# Altium footprint library Miscellaneous Devices.PcbLib: 306 footprints (part 3 of 20)
Each footprint in its own frame and in the unit in brackets; x right, y up, seen from the top. Pads: shape width x height; smd on the part's side, far side on the other; paste and mask are expansions set on the pad; w line width, h text height; cw(c..) or ccw(c..) is an arc to the next point about the centre after c.
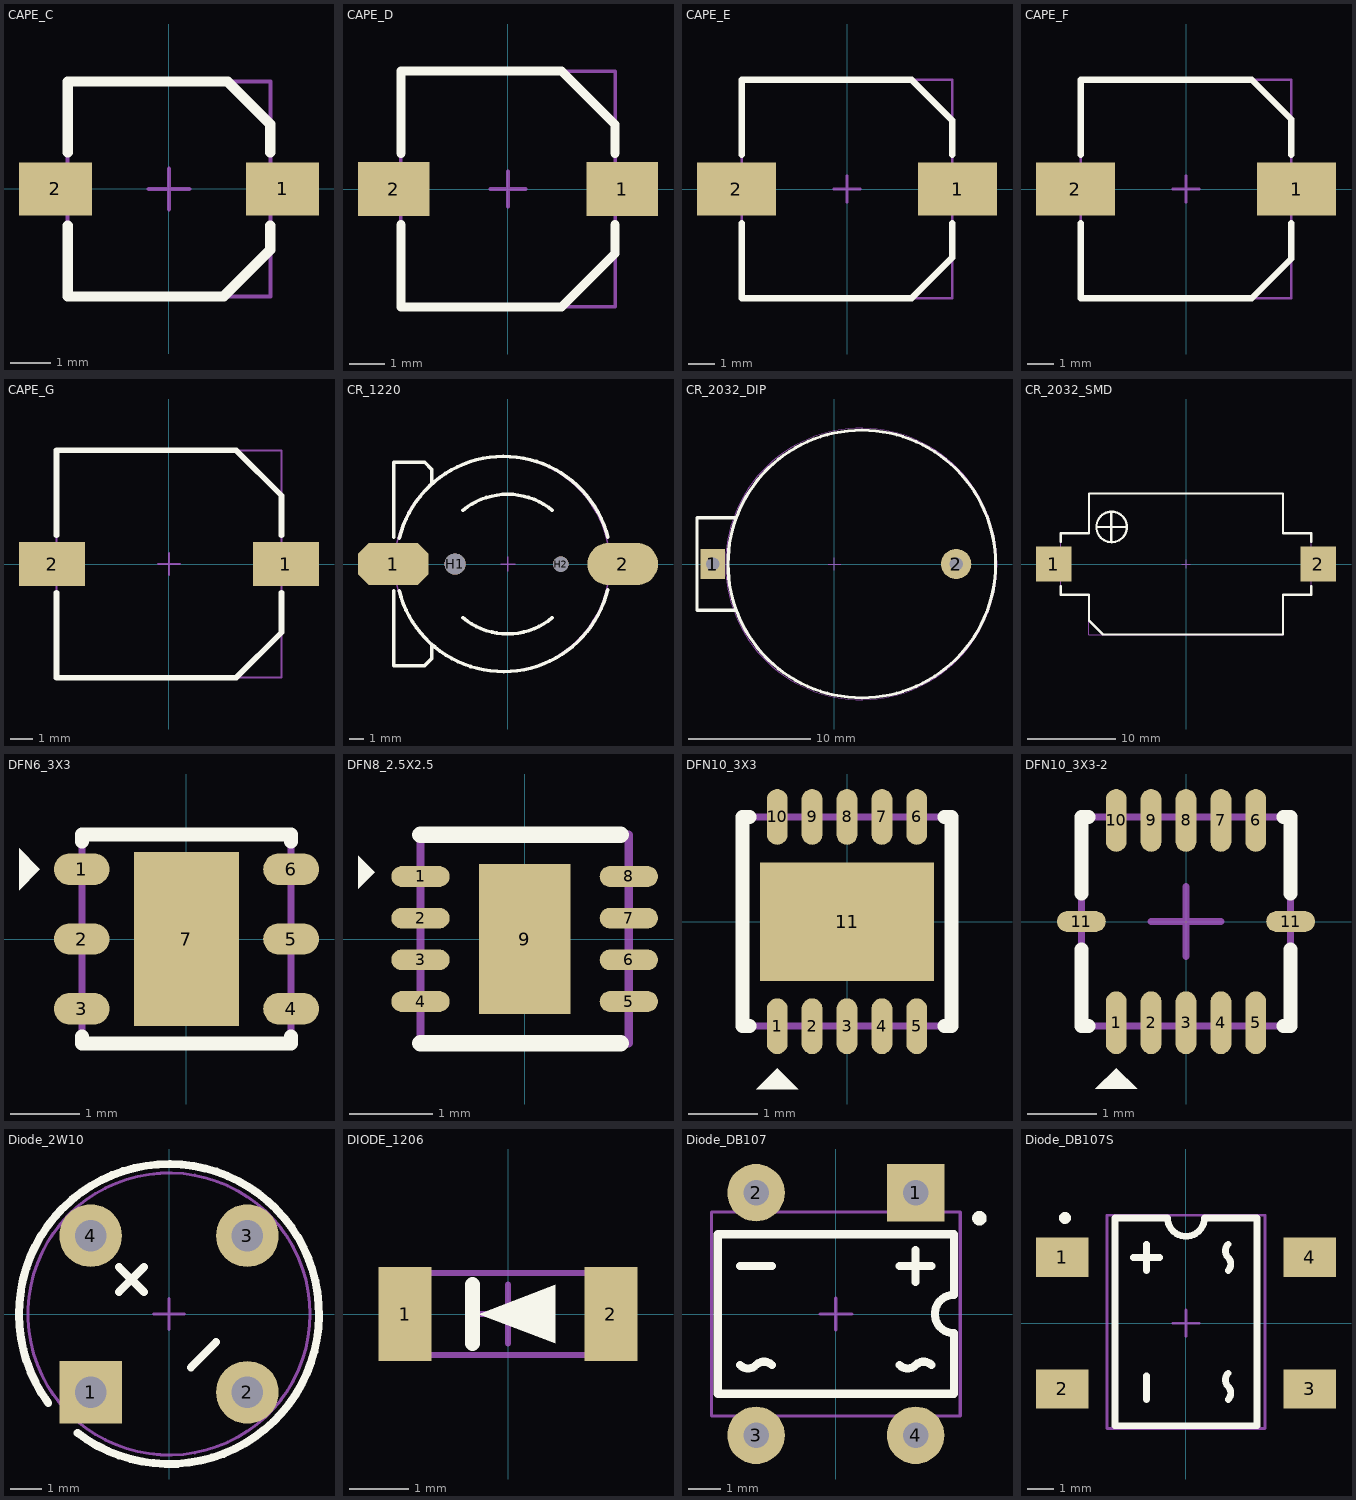
[diagram p2: the footprints below, top view; thin cyan lines are the x and y axes]

## CAPE_C [mm] "5X5.3X5.4"
pads (2):
  rect 1.8x1.3 smd: 1(2.8,0) 2(-2.8,0)
Top Overlay:
  lines w0.254: -2.5,-0.9 -2.5,-2.65 1.35,-2.65 2.5,-1.5 2.5,-0.9 ; -2.5,0.9 -2.5,2.65 1.45,2.65 2.5,1.6 2.5,0.9
Mechanical 15:
  lines w0.1: -0.5,0 0.5,0 ; 0,-0.5 0,0.5 ; -2.5,-2.65 -2.5,2.65 2.5,2.65 2.5,-2.65 -2.5,-2.65
3D body: height 5.41, standoff 0, extent -2.95,-2.6 2.95,2.7

## CAPE_D [mm] "6.3X6.6X5.4"
pads (2):
  rect 2x1.5 smd: 1(3.2,0) 2(-3.2,0)
Top Overlay:
  lines w0.254: -3,-1 -3,-3.3 1.5,-3.3 3,-1.8 3,-1 ; -3,1 -3,3.3 1.5,3.3 3,1.8 3,1
Mechanical 15:
  lines w0.1: -0.5,0 0.5,0 ; 0,-0.5 0,0.5 ; -3,-3.3 -3,3.3 3,3.3 3,-3.3 -3,-3.3
3D body: height 5.4, standoff 0, extent -3.5,-3.3 3.5,3.3

## CAPE_E [mm] "8X8.3X6.2"
pads (2):
  rect 3x2 smd: 1(4.2,0) 2(-4.2,0)
Top Overlay:
  lines w0.254: -4,-1.3 -4,-4.15 2.45,-4.15 4,-2.6 4,-1.3 ; -4,1.3 -4,4.15 2.45,4.15 4,2.6 4,1.3
Mechanical 15:
  lines w0.1: -0.5,0 0.5,0 ; 0,-0.5 0,0.5 ; -4,-4.15 -4,4.15 4,4.15 4,-4.15 -4,-4.15
3D body: height 6.2, standoff 0, extent -4.5,-4.15 4.5,4.15

## CAPE_F [mm] "8X8.3X10.2"
pads (2):
  rect 3x2 smd: 1(4.2,0) 2(-4.2,0)
Top Overlay:
  lines w0.254: -4,-1.3 -4,-4.15 2.5,-4.15 4,-2.65 4,-1.3 ; -4,1.3 -4,4.15 2.5,4.15 4,2.65 4,1.3
Mechanical 15:
  lines w0.1: -0.5,0 0.5,0 ; 0,-0.5 0,0.5 ; -4,-4.15 -4,4.15 4,4.15 4,-4.15 -4,-4.15
3D body: height 10.2, standoff 0, extent -4.95,-4.15 4.95,4.15

## CAPE_G [mm] "10X10.3X10.2"
pads (2):
  rect 3x2 smd: 1(5.3,0) 2(-5.3,0)
Top Overlay:
  lines w0.254: -5.1,-1.3 -5.1,-5.15 3.05,-5.15 5.1,-3.1 5.1,-1.3 ; -5.1,1.3 -5.1,5.15 3.05,5.15 5.1,3.1 5.1,1.3
Mechanical 15:
  lines w0.1: -0.5,0 0.5,0 ; 0,-0.5 0,0.5 ; -5.1,-5.15 5.1,-5.15 5.1,5.15 -5.1,5.15 -5.1,-5.15
3D body: height 10.2, standoff 0, extent -5.8,-5.15 5.8,5.15

## CR_1220 [mm]
pads (4):
  oct 5x3 smd: 1(-8.128,0)
  oval 5x3 smd: 2(8.128,0)
  round 1.5 hole 1.5 unplated: H1(-3.75,0)
  round 1.1 hole 1.1 unplated: H2(3.75,0)
Top Overlay:
  lines w0.254: -8.1,-1.9 -8.1,-7.194 -5.894,-7.194 -5.4,-6.7 -5.4,-5.7 ; -8.1,1.9 -8.1,7.206 -5.906,7.206 -5.4,6.7 -5.4,5.7 ; -7.714,-1.903 ccw(c-0.334,-0.004) 7.067,-1.817 ; -7.702,1.825 cw(c-0.302,0.007) 7.08,1.895 ; -3.2,-3.8 ccw(c-0.025,0.01) 3.147,-3.802 ; -3.2,3.8 cw(c-0.031,-0.015) 3.141,3.798
Mechanical 15:
  circle w0.1: c-0.4,0 r7.6
  lines w0.1: -0.5,0 0.5,0 ; 0,-0.5 0,0.5
3D body: height 4.04, standoff -0.9, extent -9.5,-7.506 9,7.491

## CR_2032_DIP [mm]
pads (2):
  rect 2x2.5 hole 1.1: 1(-10,0)
  round 2.5 hole 1.1: 2(10,0)
Top Overlay:
  circle w0.254: c2.251,0 r11
  lines w0.254: -8.199,-3.8 -11.3,-3.8 -11.3,3.8 -8.199,3.8
Mechanical 15:
  circle w0.1: c2.2,0 r11.16
  lines w0.1: -0.5,0 0.5,0 ; 0,-0.5 0,0.5
3D body: height 8.6, standoff -3.9, extent -11.14,-11 13.36,11

## CR_2032_SMD [mm]
pads (2):
  rect 4x4 smd: 1(-15,0) 2(15,0)
Top Overlay:
  circle w0.254: c-8.427,4.2 r1.727
  lines w0.25: -10.151,4.202 -6.773,4.202
  lines w0.254: -14.2,-2.5 -14.2,-3.49 -11.004,-3.49 -11,-3.494 -11,-6.4 -9.4,-8 11,-8 11,-3.494 11.004,-3.49 14.2,-3.49 14.2,-2.5 ; -14.2,2.5 -14.2,3.49 -11,3.49 -11,8 11,8 11,3.49 14.2,3.49 14.2,2.5 ; -8.462,2.578 -8.462,5.753
Mechanical 15:
  lines w0.1: -0.5,0 0.5,0 ; 0,-0.5 0,0.5 ; -14.2,-3.5 -11,-3.5 -11,-8 11,-8 11,-3.5 14.2,-3.5 14.2,3.5 11,3.5 11,8 -11,8 -11,3.5 -14.2,3.5 -14.2,-3.5
3D body: height 5.7, standoff 0.1, extent -16.1,-8 16.1,8

## DFN6_3X3 [mm] "0.95"
pads (7):
  oval 0.8x0.45 smd: 1(-1.5,1) 2(-1.5,0) 3(-1.5,-1) 4(1.5,-1) 5(1.5,0) 6(1.5,1)
  rect 1.5x2.5 smd: 7(0,0)
Top Overlay:
  region: -2.1,1 -2.4,1.3 -2.4,0.7
  lines w0.2: -1.5,-1.4 -1.5,-1.5 1.5,-1.5 1.5,-1.4 ; -1.5,1.4 -1.5,1.5 1.5,1.5 1.5,1.4
Mechanical 15:
  lines w0.1: -1.5,-1.5 1.5,-1.5 1.5,1.5 -1.5,1.5 -1.5,-1.5
3D body: height 0.8, standoff 0, extent -1.55,-1.5 1.55,1.5

## DFN8_2.5X2.5 [mm]
pads (9):
  oval 0.7x0.25 smd: 1(-1.25,0.75) 2(-1.25,0.25) 3(-1.25,-0.25) 4(-1.25,-0.75) 5(1.25,-0.75) 6(1.25,-0.25) 7(1.25,0.25) 8(1.25,0.75)
  rect 1.1x1.8 smd: 9(0,0)
Top Overlay:
  region: -1.8,0.8 -2,1 -2,0.6
  lines w0.2: -1.25,-1.25 1.15,-1.25 ; -1.25,1.25 1.15,1.25
Mechanical 15:
  lines w0.1: -1.25,-1.25 -1.25,1.25 1.25,1.25 1.25,-1.25 -1.25,-1.25

## DFN10_3X3 [mm]
pads (11):
  oval 0.3x0.8 smd: 1(-1,-1.5) 2(-0.5,-1.5) 3(0,-1.5) 4(0.5,-1.5) 5(1,-1.5) 6(1,1.5) 7(0.5,1.5) 8(0,1.5) 9(-0.5,1.5) 10(-1,1.5)
  rect 2.5x1.7 smd: 11(0,0)
Top Overlay:
  region: -1,-2.1 -1.3,-2.4 -0.7,-2.4
  lines w0.2: -1.4,-1.5 -1.5,-1.5 -1.5,1.5 -1.4,1.5 ; 1.4,-1.5 1.5,-1.5 1.5,1.5 1.4,1.5
Mechanical 15:
  lines w0.1: -1.5,-1.5 -1.5,1.5 1.5,1.5 1.5,-1.5 -1.5,-1.5
3D body: height 0.8, standoff 0, extent -1.5,-1.5 1.5,1.5

## DFN10_3X3-2 [mm]
pads (12):
  oval 0.3x0.9 smd: 1(-1,-1.45) 2(-0.5,-1.45) 3(0,-1.45) 4(0.5,-1.45) 5(1,-1.45) 6(1,1.45) 7(0.5,1.45) 8(0,1.45) 9(-0.5,1.45) 10(-1,1.45)
  oval 0.7x0.3 smd: 11(-1.5,0) 11(1.5,0)
Top Overlay:
  region: -1,-2.1 -1.3,-2.4 -0.7,-2.4
  lines w0.2: -1.5,-0.4 -1.5,-1.5 -1.4,-1.5 ; -1.5,0.4 -1.5,1.5 -1.4,1.5 ; 1.4,-1.5 1.5,-1.5 1.5,-0.4 ; 1.4,1.5 1.5,1.5 1.5,0.4
Mechanical 15:
  lines w0.1: -0.5,0 0.5,0 ; 0,-0.5 0,0.5 ; -1.5,-1.5 -1.5,1.5 1.5,1.5 1.5,-1.5 -1.5,-1.5
3D body: height 0.8, standoff 0, extent -1.5,-1.5 1.5,1.5

## Diode_2W10 [mm]
pads (4):
  rect 2x2 hole 1: 1(-2.5,-2.5)
  round 2 hole 1: 2(2.5,-2.5) 3(2.5,2.5) 4(-2.5,2.5)
Top Overlay:
  lines w0.254: -3.853,-2.839 cw(c0,0) -2.918,-3.793 ; -1.6,0.7 -0.8,1.5 ; -1.6,1.5 -0.8,0.7 ; 0.7,-1.7 1.5,-0.9
Mechanical 15:
  circle w0.1: c0,0 r4.5
  lines w0.1: -0.5,0 0.5,0 ; 0,-0.5 0,0.5
3D body: height 8, standoff -10, extent -4.5,-4.5 4.5,4.5

## DIODE_1206 [mm]
pads (2):
  rect 0.9x1.6 smd: 1(-1.75,0) 2(1.75,0)
Top Overlay:
  region: -0.5,0 0.8,0.5 0.8,-0.5
  lines w0.254: -0.6,-0.5 -0.6,0.5
Mechanical 15:
  lines w0.1: -0.5,0 0.5,0 ; 0,-0.5 0,0.5 ; -1.5,-0.7 1.5,-0.7 1.5,0.7 -1.5,0.7 -1.5,-0.7
3D body: height 1.4, standoff 0, extent -1.7,-0.7 1.7,0.7

## Diode_DB107 [mm]
pads (4):
  rect 1.8x1.8 hole 0.8: 1(2.5,3.8)
  round 1.8 hole 0.8: 2(-2.5,3.8) 3(-2.5,-3.8) 4(2.5,-3.8)
Top Overlay:
  circle w0.254: c4.5,3 r0.1
  lines w0.254: -3,-1.6 ccw(c-2.75,-1.35) -2.5,-1.6 cw(c-2.25,-1.85) -2,-1.6 ; -3,1.5 -2,1.5 ; 2,-1.6 ccw(c2.25,-1.35) 2.5,-1.6 cw(c2.75,-1.85) 3,-1.6 ; 2,1.5 3,1.5 ; 2.5,1 2.5,2 ; -3.7,-2.5 -3.7,2.5 3.7,2.5 3.7,0.6 ccw(c3.7,0) 3.7,-0.6 3.7,-2.5 -3.7,-2.5
Mechanical 15:
  lines w0.1: -0.5,0 0.5,0 ; 0,-0.5 0,0.5 ; -3.9,-3.2 -3.9,3.2 3.9,3.2 3.9,-3.2 -3.9,-3.2
3D body: height 3.8, standoff -2.7, extent -3.85,-3.983 3.85,4

## Diode_DB107S [mm]
pads (4):
  rect 2x1.5 smd: 1(-4.7,2.5) 2(-4.7,-2.5) 3(4.7,-2.5) 4(4.7,2.5)
Top Overlay:
  circle w0.254: c-4.6,4 r0.1
  lines w0.254: -2,2.5 -1,2.5 ; -1.5,-2.9 -1.5,-2 ; -1.5,2 -1.5,3 ; 1.6,-2.9 ccw(c1.35,-2.65) 1.6,-2.4 cw(c1.85,-2.15) 1.6,-1.9 ; 1.6,2 ccw(c1.35,2.25) 1.6,2.5 cw(c1.85,2.75) 1.6,3 ; -2.7,-3.9 2.7,-3.9 2.7,4 0.7,4 cw(c0,4) -0.7,4 -2.7,4 -2.7,-3.9
Mechanical 15:
  lines w0.1: -0.5,0 0.5,0 ; 0,-0.5 0,0.5 ; -3,-4 -3,4.1 3,4.1 3,-4 -3,-4
3D body: height 2.7, standoff 0, extent -5.075,-4 5.075,4.1